# Altium footprint library FootPrintLib_3.PcbLib: 198 footprints (part 7 of 13)
Each footprint in its own frame and in the unit in brackets; x right, y up, seen from the top. Pads: shape width x height; smd on the part's side, far side on the other; paste and mask are expansions set on the pad; w line width, h text height; cw(c..) or ccw(c..) is an arc to the next point about the centre after c.
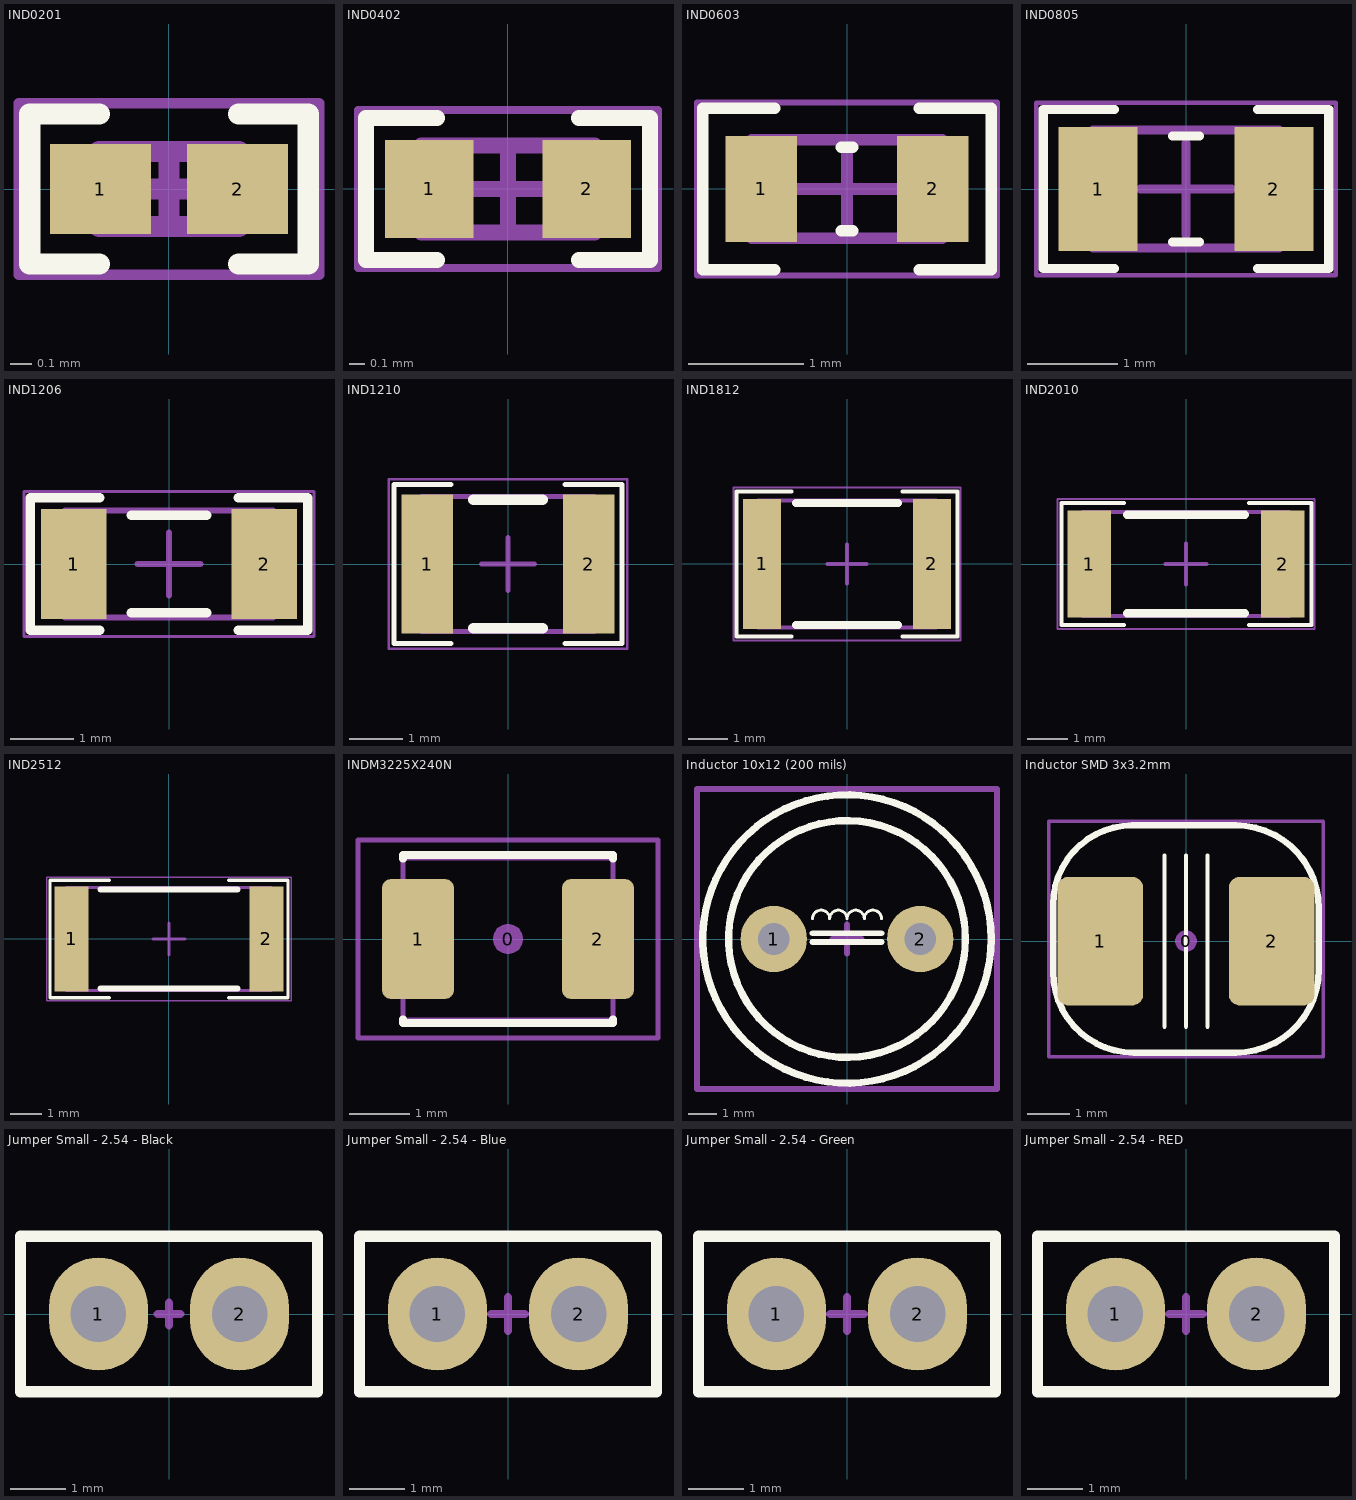
[diagram p6: the footprints below, top view; thin cyan lines are the x and y axes]

## IND0201 [mm] "Chip Inductor, 2-Leads, Body 0/60x0/30mm, IPC Medium Density DESIGNER:ABBAS BASEREH"
height 0.23
pads (2):
  rect 0.47x0.42 smd mask+0.04: 1(-0.32,0) 2(0.32,0)
Top Overlay:
  lines w0.1: -0.325,-0.35 -0.65,-0.35 -0.65,0.35 -0.325,0.35 ; 0.325,-0.35 0.65,-0.35 0.65,0.35 0.325,0.35
Mechanical 13:
  lines w0.1: -0.325,-0.175 0.325,-0.175 0.325,0.175 -0.325,0.175 -0.325,-0.175
Mechanical 15:
  lines w0.05: -0.7,-0.4 0.7,-0.4 0.7,0.4 -0.7,0.4 -0.7,-0.4
  lines w0.1: -0.175,0 0.175,0 ; 0,-0.175 0,0.175
3D body "IND0201.step": height 0.23, standoff 0, extent -0.325,-0.175 0.325,0.175

## IND0402 [mm] "Chip Inductor, 2-Leads, Body 1/00x0/50mm, IPC Medium Density DESIGNER:ABBAS BASEREH"
height 0.32
pads (2):
  rect 0.56x0.62 smd mask+0.06: 1(-0.5,0) 2(0.5,0)
Top Overlay:
  lines w0.1: -0.45,-0.45 -0.9,-0.45 -0.9,0.45 -0.45,0.45 ; 0.45,-0.45 0.9,-0.45 0.9,0.45 0.45,0.45
Mechanical 13:
  lines w0.1: -0.55,-0.275 -0.55,0.275 0.55,0.275 0.55,-0.275 -0.55,-0.275
Mechanical 15:
  lines w0.05: -0.95,-0.5 -0.95,0.5 0.95,0.5 0.95,-0.5 -0.95,-0.5
  lines w0.1: -0.275,0 0.275,0 ; 0,-0.275 0,0.275
3D body "IND0402.step": height 0.32, standoff 0, extent -0.55,-0.275 0.55,0.275

## IND0603 [mm] "Chip Inductor, 2-Leads, Body 1/60x0/80mm, IPC Medium Density DESIGNER:ABBAS BASEREH"
height 0.4
pads (2):
  rect 0.62x0.92 smd: 1(-0.745,0) 2(0.745,0)
Top Overlay:
  lines w0.1: -0.625,-0.7 -1.25,-0.7 -1.25,0.7 -0.625,0.7 ; -0.05,-0.36 0.05,-0.36 ; -0.05,0.36 0.05,0.36 ; 0.625,-0.7 1.25,-0.7 1.25,0.7 0.625,0.7
Mechanical 13:
  lines w0.1: -0.825,-0.425 -0.825,0.425 0.825,0.425 0.825,-0.425 -0.825,-0.425
Mechanical 15:
  lines w0.05: -1.3,-0.75 -1.3,0.75 1.3,0.75 1.3,-0.75 -1.3,-0.75
  lines w0.1: -0.425,0 0.425,0 ; 0,-0.425 0,0.425
3D body "IND0603.step": height 0.4, standoff 0, extent -0.825,-0.425 0.825,0.425

## IND0805 [mm] "Chip Inductor, 2-Leads, Body 2/00x1/25mm, IPC Medium Density DESIGNER:ABBAS BASEREH"
height 0.5
pads (2):
  rect 0.87x1.37 smd: 1(-0.97,0) 2(0.97,0)
Top Overlay:
  lines w0.1: -0.788,-0.875 -1.575,-0.875 -1.575,0.875 -0.788,0.875 ; -0.15,-0.585 0.15,-0.585 ; -0.15,0.585 0.15,0.585 ; 0.788,-0.875 1.575,-0.875 1.575,0.875 0.788,0.875
Mechanical 13:
  lines w0.1: -1.025,-0.65 1.025,-0.65 1.025,0.65 -1.025,0.65 -1.025,-0.65
Mechanical 15:
  lines w0.05: -1.65,-0.95 1.65,-0.95 1.65,0.95 -1.65,0.95 -1.65,-0.95
  lines w0.1: -0.5,0 0.5,0 ; 0,-0.5 0,0.5
3D body "IND0805.step": height 0.5, standoff 0, extent -1.025,-0.65 1.025,0.65

## IND1206 [mm] "Chip Inductor, 2-Leads, Body 3/20x1/60mm, IPC Medium Density DESIGNER:ABBAS BASEREH"
height 0.94
pads (2):
  rect 1.04x1.74 smd: 1(-1.51,0) 2(1.51,0)
Top Overlay:
  lines w0.15: -1.1,-1.05 -2.2,-1.05 -2.2,1.05 -1.1,1.05 ; -0.6,-0.77 0.6,-0.77 ; -0.6,0.77 0.6,0.77 ; 1.1,-1.05 2.2,-1.05 2.2,1.05 1.1,1.05
Mechanical 13:
  lines w0.1: -1.65,-0.85 -1.65,0.85 1.65,0.85 1.65,-0.85 -1.65,-0.85
Mechanical 15:
  lines w0.05: -2.3,-1.15 -2.3,1.15 2.3,1.15 2.3,-1.15 -2.3,-1.15
  lines w0.1: -0.5,0 0.5,0 ; 0,-0.5 0,0.5
3D body "IND1206.step": height 0.94, standoff 0, extent -1.65,-0.85 1.65,0.85

## IND1210 [mm] "Chip Inductor, 2-Leads, Body 3/20x2/50mm, IPC Medium Density DESIGNER:ABBAS BASEREH"
height 0.55
pads (2):
  rect 0.97x2.62 smd: 1(-1.52,0) 2(1.52,0)
Top Overlay:
  lines w0.1: -1.075,-1.5 -2.15,-1.5 -2.15,1.5 -1.075,1.5 ; 1.075,-1.5 2.15,-1.5 2.15,1.5 1.075,1.5
  lines w0.2: -0.65,-1.21 0.65,-1.21 ; -0.65,1.21 0.65,1.21
Mechanical 13:
  lines w0.1: -1.625,-1.275 -1.625,1.275 1.625,1.275 1.625,-1.275 -1.625,-1.275
Mechanical 15:
  lines w0.05: -2.25,-1.6 -2.25,1.6 2.25,1.6 2.25,-1.6 -2.25,-1.6
  lines w0.1: -0.5,0 0.5,0 ; 0,-0.5 0,0.5
3D body "IND1210.step": height 0.55, standoff 0, extent -1.625,-1.275 1.625,1.275

## IND1812 [mm] "Chip Inductor, 2-Leads, Body 4/50x3/20mm, IPC Medium Density DESIGNER:ABBAS BASEREH"
height 0.55
pads (2):
  rect 0.97x3.32 smd: 1(-2.17,0) 2(2.17,0)
Top Overlay:
  lines w0.1: -1.413,-1.85 -2.825,-1.85 -2.825,1.85 -1.413,1.85 ; 1.413,-1.85 2.825,-1.85 2.825,1.85 1.413,1.85
  lines w0.2: -1.3,-1.56 1.3,-1.56 ; -1.3,1.56 1.3,1.56
Mechanical 13:
  lines w0.1: -2.275,-1.625 -2.275,1.625 2.275,1.625 2.275,-1.625 -2.275,-1.625
Mechanical 15:
  lines w0.05: -2.9,-1.95 -2.9,1.95 2.9,1.95 2.9,-1.95 -2.9,-1.95
  lines w0.1: -0.5,0 0.5,0 ; 0,-0.5 0,0.5
3D body "IND1812.step": height 0.55, standoff 0, extent -2.275,-1.625 2.275,1.625

## IND2010 [mm] "Chip Inductor, 2-Leads, Body 5/00x2/50mm, IPC Medium Density DESIGNER:ABBAS BASEREH"
height 0.55
pads (2):
  rect 1.07x2.62 smd: 1(-2.37,0) 2(2.37,0)
Top Overlay:
  lines w0.1: -1.519,-1.5 -3.05,-1.5 -3.05,1.5 -1.519,1.5 ; 1.544,-1.5 3.075,-1.5 3.075,1.5 1.544,1.5
  lines w0.2: -1.45,-1.21 1.45,-1.21 ; -1.45,1.21 1.45,1.21
Mechanical 13:
  lines w0.1: -2.525,-1.275 -2.525,1.275 2.525,1.275 2.525,-1.275 -2.525,-1.275
Mechanical 15:
  lines w0.05: -3.15,-1.6 -3.15,1.6 3.15,1.6 3.15,-1.6 -3.15,-1.6
  lines w0.1: -0.5,0 0.5,0 ; 0,-0.5 0,0.5
3D body "IND2010.step": height 0.55, standoff 0, extent -2.525,-1.275 2.525,1.275

## IND2512 [mm] "Chip Inductor, 2-Leads, Body 6/40x3/20mm, IPC Medium Density DESIGNER:ABBAS BASEREH"
height 0.7
pads (2):
  rect 1.07x3.32 smd: 1(-3.07,0) 2(3.07,0)
Top Overlay:
  lines w0.1: -1.875,-1.85 -3.75,-1.85 -3.75,1.85 -1.875,1.85 ; 1.875,-1.85 3.75,-1.85 3.75,1.85 1.875,1.85
  lines w0.2: -2.15,-1.56 2.15,-1.56 ; -2.15,1.56 2.15,1.56
Mechanical 13:
  lines w0.1: -3.225,-1.625 -3.225,1.625 3.225,1.625 3.225,-1.625 -3.225,-1.625
Mechanical 15:
  lines w0.05: -3.85,-1.95 -3.85,1.95 3.85,1.95 3.85,-1.95 -3.85,-1.95
  lines w0.1: -0.5,0 0.5,0 ; 0,-0.5 0,0.5
3D body "IND2512.step": height 0.7, standoff 0, extent -3.225,-1.625 3.225,1.625

## INDM3225X240N [mm] "Molded Inductor, 2-Leads, Body 3.2x2.5mm, IPC Medium Density"
height 2.4
pads (3):
  round 0.508 on Mech15: 0(0,0)
  rrect25% 1.2x2 smd: 1(-1.5,0) 2(1.5,0)
Top Overlay:
  lines w0.127: -1.75,-1.338 -1.75,-1.4 1.75,-1.4 1.75,-1.338 ; -1.75,1.338 -1.75,1.4 1.75,1.4 1.75,1.338
Mechanical 13:
  lines w0.076: -1.75,-1.35 1.75,-1.35 1.75,1.35 -1.75,1.35 -1.75,-1.35
Mechanical 15:
  lines w0.076: -2.5,-1.65 2.5,-1.65 2.5,1.65 -2.5,1.65 -2.5,-1.65
3D body "INDM3225X240N.STEP": height 2.4, standoff 0, extent -1.79,-1.35 1.79,1.35

## Inductor 10x12 (200 mils) [mm] "POWER INDUCTOR 10x12 (200 mils) DESIGNER ABBAS BASEREH"
height 12
pads (2):
  round 2.3 hole 1.1: 1(-2.54,0) 2(2.54,0)
Top Overlay:
  circle w0.254: c0,0 r4.105
  circle w0.254: c0,0 r5
  lines w0.1: -1.2,0.7 cw(c-0.9,0.7) -0.6,0.7 cw(c-0.3,0.7) 0,0.7 cw(c0.3,0.7) 0.6,0.7 cw(c0.9,0.7) 1.2,0.7
  lines w0.2: -1.2,-0.1 1.2,-0.1 ; -1.2,0.2 1.2,0.2
Mechanical 15:
  lines w0.2: -0.5,0 0.5,0 ; 0,-0.5 0,0.5 ; -5.2,-5.2 -5.2,5.2 5.2,5.2 5.2,-5.2 -5.2,-5.2
3D body "User Library-Inductor 10x12 (200 mils).STEP": height 12.13, standoff -3.87, extent -5,-5 5,5

## Inductor SMD 3x3.2mm [mm] "Inductor 4.7µH SMD 3x3.2mm"
pads (3):
  round 0.508 on Mech15: 0(0,0)
  rrect25% 2x3 smd: 1(-2,0) 2(2,0)
Top Overlay:
  lines w0.1: -0.5,-2 -0.5,2 ; 0,-2 0,2 ; 0.5,-2 0.5,2
  lines w0.15: -3.1,-0.725 ccw(c-1.225,-0.725) -1.225,-2.6 1.165,-2.6 ccw(c1.165,-0.665) 3.1,-0.665 3.1,0.765 ccw(c1.165,0.765) 1.165,2.7 -1.252,2.7 ccw(c-1.252,0.852) -3.1,0.852 -3.1,-0.725
Mechanical 15:
  lines w0.076: -3.2,-2.7 -3.2,2.8 3.2,2.8 3.2,-2.7 -3.2,-2.7
3D body "smd self 4.7uH.stp": height 4.5, standoff 0, extent -2.899,-2.6 2.889,2.6

## Jumper Small - 2.54 - Black [mil] "Designer Abbas Basereh"
height 300
pads (2):
  oval 70x80 hole 39.37: 1(-50,0) 2(50,0)
Top Overlay:
  lines w7.87: -105.12,-55.12 -105.12,55.12 105.12,55.12 105.12,-55.12 -105.12,-55.12
Mechanical 15:
  lines w5.91: -7.87,0 7.87,0 ; 0,-7.87 0,7.87 ; -106.3,-55.12 -106.3,55.12 106.3,55.12 106.3,-55.12 -106.3,-55.12
3D body "header02.STEP": height 330, standoff -100, extent -100,-50 100,50
3D body "jumper_akspt_g-red.STEP": height 337.4, standoff 102.36, extent -98.03,-48.03 98.04,48.04

## Jumper Small - 2.54 - Blue [mil] "Designer Abbas Basereh"
height 300
pads (2):
  oval 70x80 hole 39.37: 1(-50,0) 2(50,0)
Top Overlay:
  lines w7.87: -105.12,-55.12 -105.12,55.12 105.12,55.12 105.12,-55.12 -105.12,-55.12
Mechanical 15:
  lines w5.91: -11.81,0 11.81,0 ; 0,-11.81 0,11.81 ; -106.3,-55.12 106.3,-55.12 106.3,55.12 -106.3,55.12 -106.3,-55.12
3D body "header02.STEP": height 330, standoff -100, extent -100,-50 100,50
3D body "jumper_akspt_g-red.STEP": height 337.4, standoff 102.36, extent -98.03,-48.03 98.04,48.04

## Jumper Small - 2.54 - Green [mil] "Designer Abbas Basereh"
height 300
pads (2):
  oval 70x80 hole 39.37: 1(-50,0) 2(50,0)
Top Overlay:
  lines w7.87: -105.12,-55.12 -105.12,55.12 105.12,55.12 105.12,-55.12 -105.12,-55.12
Mechanical 15:
  lines w5.91: -11.81,0 11.81,0 ; 0,-11.81 0,11.81 ; -106.3,-55.12 106.3,-55.12 106.3,55.12 -106.3,55.12 -106.3,-55.12
3D body "header02.STEP": height 330, standoff -100, extent -100,-50 100,50
3D body "jumper_akspt_g-red.STEP": height 337.4, standoff 102.36, extent -98.03,-48.03 98.04,48.04

## Jumper Small - 2.54 - RED [mil] "Designer Abbas Basereh"
height 300
pads (2):
  oval 70x80 hole 39.37: 1(-50,0) 2(50,0)
Top Overlay:
  lines w7.87: -105.12,-55.12 105.12,-55.12 105.12,55.12 -105.12,55.12 -105.12,-55.12
Mechanical 15:
  lines w5.91: -11.81,0 11.81,0 ; 0,-11.81 0,11.81 ; -106.3,-55.12 106.3,-55.12 106.3,55.12 -106.3,55.12 -106.3,-55.12
3D body "jumper_akspt_g-red.STEP": height 337.4, standoff 102.36, extent -98.03,-48.03 98.04,48.04
3D body "header02.STEP": height 330, standoff -100, extent -100,-50 100,50